# Altium footprint library 150202M153130.PcbLib: 1 footprints
Each footprint in its own frame and in the unit in brackets; x right, y up, seen from the top. Pads: shape width x height; smd on the part's side, far side on the other; paste and mask are expansions set on the pad; w line width, h text height; cw(c..) or ccw(c..) is an arc to the next point about the centre after c.
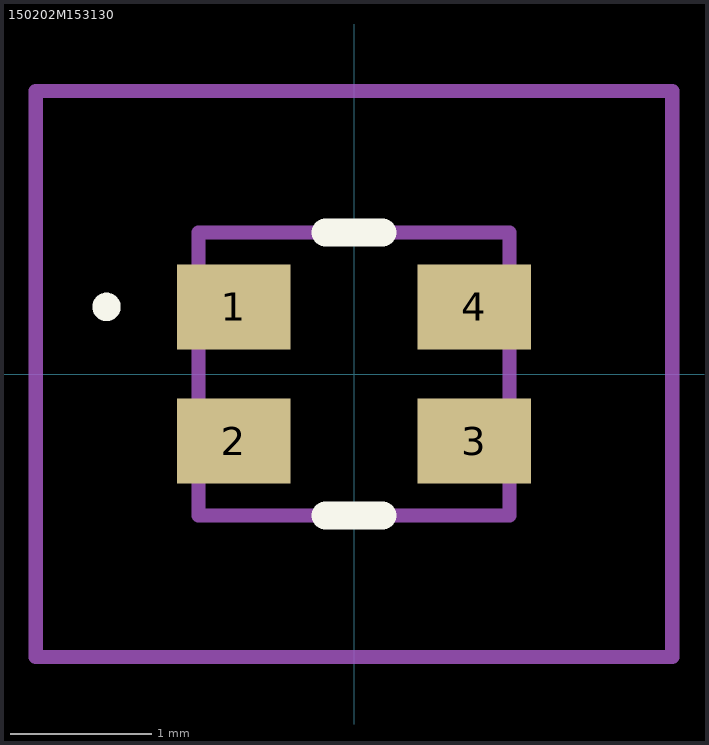
[diagram p0: the footprint, top view; thin cyan lines are the x and y axes]

## 150202M153130 [mm]
pads (4):
  rect 0.8x0.6 smd: 1(-0.85,0.475) 2(-0.85,-0.475) 3(0.85,-0.475) 4(0.85,0.475)
Top Overlay:
  lines w0.1: -1.8,0.475 cw(c-1.75,0.475) -1.7,0.475 ; -1.8,0.475 -1.8,0.475 ; -1.8,0.475 ccw(c-1.75,0.475) -1.7,0.475 ; -1.7,0.475 -1.7,0.475
  lines w0.2: -0.2,-1 0.2,-1 ; -0.2,1 0.2,1
Mechanical 15:
  lines w0.1: -1.1,-1 1.1,-1 1.1,1 -1.1,1 -1.1,-1
Mechanical 20:
  lines w0.1: -2.25,-2 2.25,-2 2.25,2 -2.25,2 -2.25,-2